# Altium footprint library DIM.PcbLib: 183 footprints (part 5 of 12)
Each footprint in its own frame and in the unit in brackets; x right, y up, seen from the top. Pads: shape width x height; smd on the part's side, far side on the other; paste and mask are expansions set on the pad; w line width, h text height; cw(c..) or ccw(c..) is an arc to the next point about the centre after c.
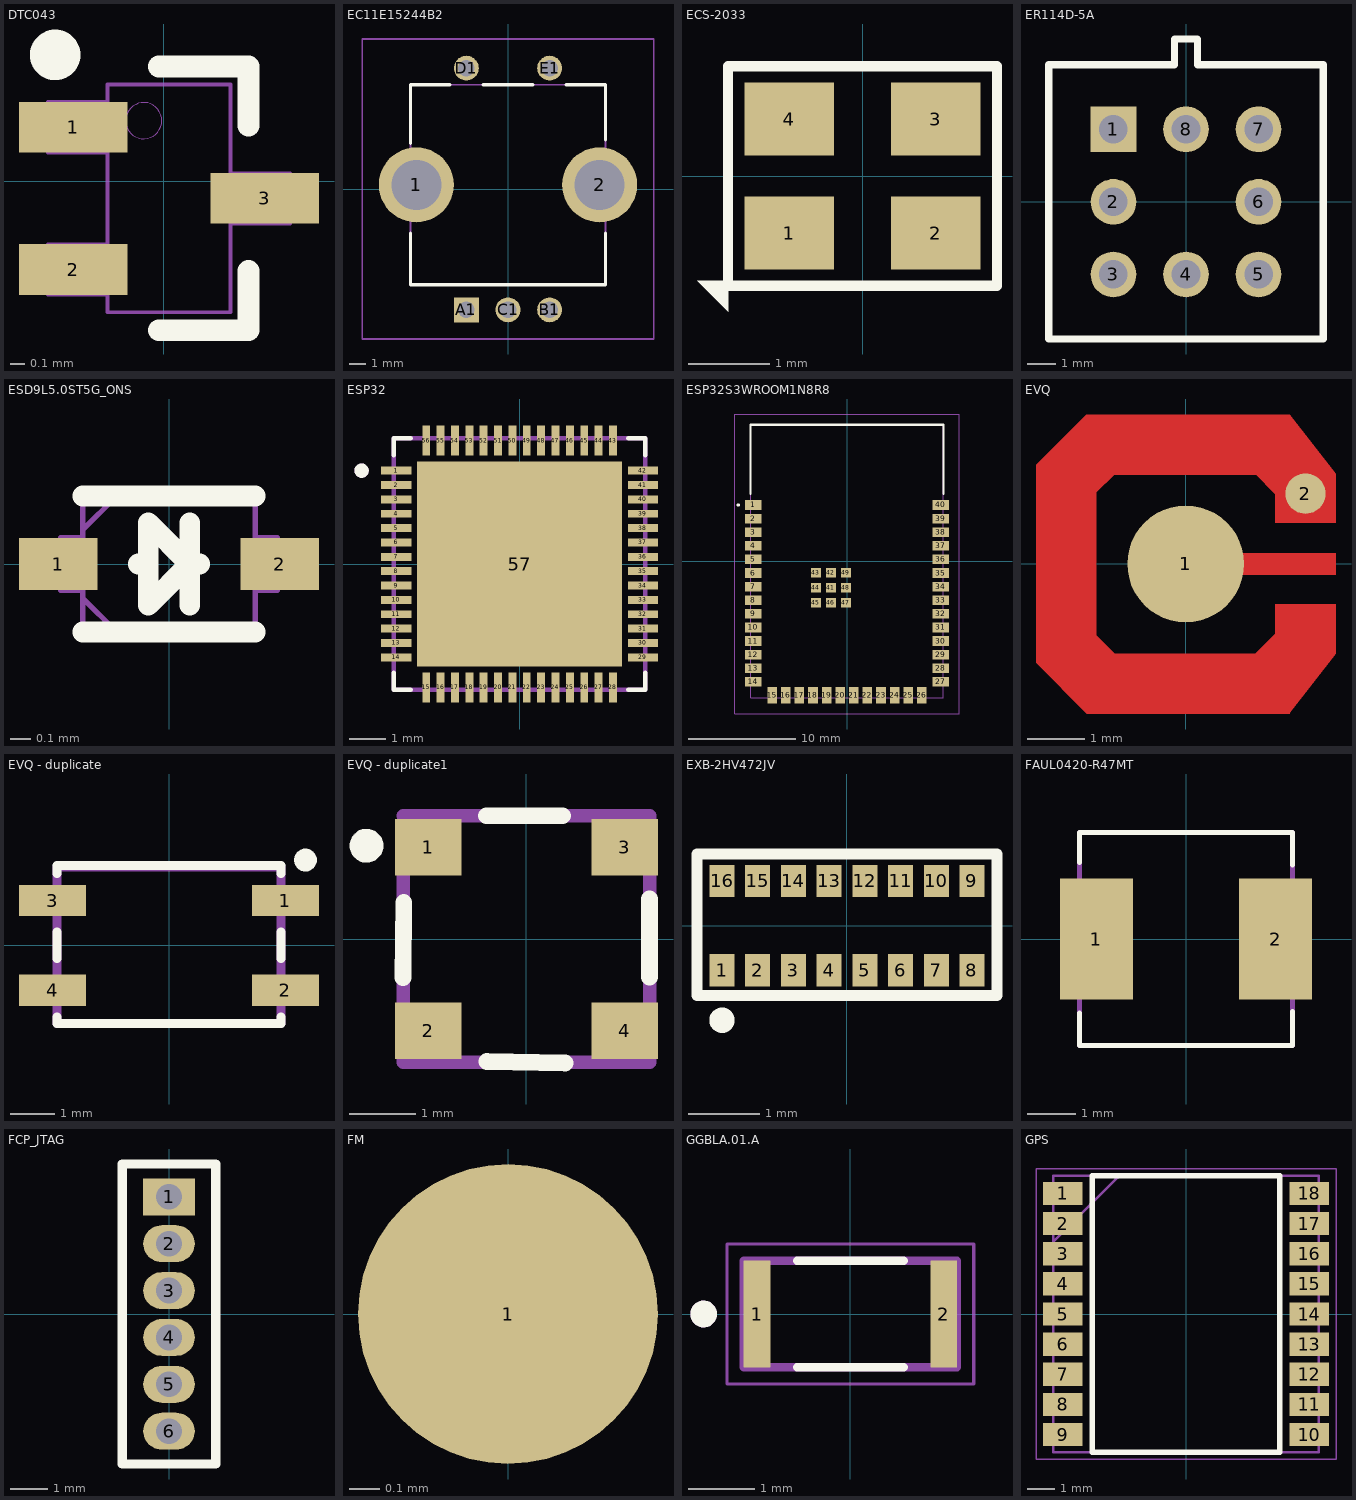
[diagram p4: the footprints below, top view; thin cyan lines are the x and y axes]

## DTC043 [mil]
pads (3):
  rect 30x14 smd: 1(-25,15) 3(28,-4.68)
  rect 30x14 smd mask+4: 2(-25,-24.37)
Top Overlay:
  circle w10: c-30,35 r2
  lines w6: -1.32,-41.19 23.5,-41.19 23.5,-24.79 ; -1.32,31.82 23.5,31.82 23.5,15.41
Mechanical 13:
  circle w0: c-5.5,16.82 r5
  lines w1: -32,-31.37 -32,-17.37 -15.5,-17.37 -15.5,-31.37 -32,-31.37 ; -32,8 -32,22 -15.5,22 -15.5,8 -32,8 ; -15.5,-36.19 -15.5,26.82 18.5,26.82 18.5,-36.19 -15.5,-36.19 ; 18.5,-11.69 18.5,2.31 35,2.31 35,-11.69 18.5,-11.69
3D body "TRANS_2SC4617EB_ROM.step": height 35.12, standoff 0, extent -32,-36.18 35,26.81

## EC11E15244B2 [mm]
pads (7):
  round 4.5 hole 3: 1(-5.5,0.25) 2(5.5,0.25)
  rect 1.5x1.5 hole 1: A1(-2.5,-7.25)
  round 1.5 hole 1: B1(2.5,-7.25) C1(0,-7.25) D1(-2.5,7.25) E1(2.5,7.25)
Top Overlay:
  lines w0.2: -5.85,-2.65 -5.85,-5.75 5.85,-5.75 5.85,-2.65 ; -5.85,2.75 -5.85,6.25 -3.5,6.25 ; -1.5,6.25 1.5,6.25 ; 3.5,6.25 5.85,6.25 5.85,2.95
Mechanical 13:
  lines w0.1: -5.85,-5.75 5.85,-5.75 5.85,6.25 -5.85,6.25 -5.85,-5.75
Mechanical 20:
  lines w0.1: -8.75,-9 8.75,-9 8.75,9 -8.75,9 -8.75,-9
3D body "EC11E15244B2.stp": height 24.9, standoff -3.1, extent -6.524,-7.522 6.575,7.428

## ECS-2033 [mm]
pads (4):
  rect 1.1x0.9 smd: 1(-0.9,-0.7) 2(0.9,-0.7) 3(0.9,0.7) 4(-0.9,0.7)
Top Overlay:
  region: -1.651,-1.283 -2.032,-1.283 -1.651,-1.664
  lines w0.127: -1.651,-1.346 -1.651,1.346 1.651,1.346 1.651,-1.346 -1.651,-1.346
3D body: height 1, standoff 0, extent -1.27,-1.016 1.27,1.016

## ER114D-5A [mm]
pads (8):
  rect 1.6x1.6 hole 1: 1(-2.54,2.54)
  round 1.6 hole 1: 2(-2.54,0) 3(-2.54,-2.54) 4(0,-2.54) 5(2.54,-2.54) 6(2.54,0) 7(2.54,2.54) 8(0,2.54)
Top Overlay:
  lines w0.254: -4.8,-4.8 -4.8,4.8 -0.4,4.8 -0.4,5.7 0.4,5.7 0.4,4.8 4.8,4.8 4.8,-4.8 -4.8,-4.8
3D body: height 10.2, standoff 0, extent -4.826,-4.826 4.826,4.826

## ESD9L5.0ST5G_ONS [mil]
pads (2):
  rect 15x10 smd paste+0 mask+4: 1(-21.17,0) 2(21.17,0)
Top Overlay:
  lines w3.94: -16.5,-13 16.5,-13 ; -16.5,13 16.5,13 ; -5.91,0 -3.94,0 ; 3.94,-7.87 3.94,0 ; 3.94,7.87 3.94,0 ; 5.91,0 3.94,0 ; 3.94,0 -3.94,-7.87 -3.94,7.87 3.94,0
Mechanical 13:
  lines w1: -16.5,-6.5 -10,-13 ; -16.5,6.5 -10,13 ; -20.67,-5 -16.5,-5 -16.5,5 -20.67,5 -20.67,-5 ; -16.5,-13 -16.5,13 16.5,13 16.5,-13 -16.5,-13 ; 16.5,-5 20.67,-5 20.67,5 16.5,5 16.5,-5
3D body "ESD9L50ST5G_ONS.step": height 16.26, standoff 0, extent -20.67,-12.99 20.67,12.99

## ESP32 [mm]
height 0.9
pads (57):
  rect 0.84x0.22 smd mask+0.05: 1(-3.435,2.6) 2(-3.435,2.2) 3(-3.435,1.8) 4(-3.435,1.4) 5(-3.435,1) 6(-3.435,0.6) 7(-3.435,0.2) 8(-3.435,-0.2) 9(-3.435,-0.6) 10(-3.435,-1) 11(-3.435,-1.4) 12(-3.435,-1.8) 13(-3.435,-2.2) 14(-3.435,-2.6) 29(3.435,-2.6) 30(3.435,-2.2) 31(3.435,-1.8) 32(3.435,-1.4) 33(3.435,-1) 34(3.435,-0.6) 35(3.435,-0.2) 36(3.435,0.2) 37(3.435,0.6) 38(3.435,1) 39(3.435,1.4) 40(3.435,1.8) 41(3.435,2.2) 42(3.435,2.6)
  rect 0.22x0.84 smd mask+0.05: 15(-2.6,-3.435) 16(-2.2,-3.435) 17(-1.8,-3.435) 18(-1.4,-3.435) 19(-1,-3.435) 20(-0.6,-3.435) 21(-0.2,-3.435) 22(0.2,-3.435) 23(0.6,-3.435) 24(1,-3.435) 25(1.4,-3.435) 26(1.8,-3.435) 27(2.2,-3.435) 28(2.6,-3.435) 43(2.6,3.435) 44(2.2,3.435) 45(1.8,3.435) 46(1.4,3.435) 47(1,3.435) 48(0.6,3.435) 49(0.2,3.435) 50(-0.2,3.435) 51(-0.6,3.435) 52(-1,3.435) 53(-1.4,3.435) 54(-1.8,3.435) 55(-2.2,3.435) 56(-2.6,3.435)
  rect 5.7x5.7 smd paste-4 mask+0.05: 57(0,0)
Top Overlay:
  circle w0.2: c-4.4,2.6 r0.1
  lines w0.127: -3.5,-3.03 -3.5,-3.5 -3.03,-3.5 ; -3.5,3.03 -3.5,3.5 -3.03,3.5 ; 3.03,-3.5 3.5,-3.5 3.5,-3.03 ; 3.03,3.5 3.5,3.5 3.5,3.03
Top Paste:
  region: -0.525,-2.325 -2.325,-2.325 -2.325,-0.525 -0.525,-0.525
  region: 2.325,-2.325 0.525,-2.325 0.525,-0.525 2.325,-0.525
  region: 2.325,0.525 0.525,0.525 0.525,2.325 2.325,2.325
  region: -0.525,0.525 -2.325,0.525 -2.325,2.325 -0.525,2.325
Mechanical 13:
  circle w0.2: c-4.4,2.6 r0.1
  lines w0.127: -3.5,-3.5 3.5,-3.5 3.5,3.5 -3.5,3.5 -3.5,-3.5
3D body "ESP32-S3FH4R2.stp": height 0.9, standoff 0, extent -3.55,-3.55 3.55,3.55

## ESP32S3WROOM1N8R8 [mm]
pads (49):
  rect 1.5x0.9 smd: 1(-8.75,5.26) 2(-8.75,3.99) 3(-8.75,2.72) 4(-8.75,1.45) 5(-8.75,0.18) 6(-8.75,-1.09) 7(-8.75,-2.36) 8(-8.75,-3.63) 9(-8.75,-4.9) 10(-8.75,-6.17) 11(-8.75,-7.44) 12(-8.75,-8.71) 13(-8.75,-9.98) 14(-8.75,-11.25) 27(8.75,-11.25) 28(8.75,-9.98) 29(8.75,-8.71) 30(8.75,-7.44) 31(8.75,-6.17) 32(8.75,-4.9) 33(8.75,-3.63) 34(8.75,-2.36) 35(8.75,-1.09) 36(8.75,0.18) 37(8.75,1.45) 38(8.75,2.72) 39(8.75,3.99) 40(8.75,5.26)
  rect 0.9x1.5 smd: 15(-6.985,-12.5) 16(-5.715,-12.5) 17(-4.445,-12.5) 18(-3.175,-12.5) 19(-1.905,-12.5) 20(-0.635,-12.5) 21(0.635,-12.5) 22(1.905,-12.5) 23(3.175,-12.5) 24(4.445,-12.5) 25(5.715,-12.5) 26(6.985,-12.5)
  rect 0.9x0.9 smd: 41(-1.5,-2.46) 42(-1.5,-1.06) 43(-2.9,-1.06) 44(-2.9,-2.46) 45(-2.9,-3.86) 46(-1.5,-3.86) 47(-0.1,-3.86) 48(-0.1,-2.46) 49(-0.1,-1.06)
Top Overlay:
  lines w0.2: -9,6.3 -9,12.75 9,12.75 9,6.3 ; -10.2,5.26 ccw(c-10.15,5.26) -10.1,5.26 ; -10.2,5.26 cw(c-10.15,5.26) -10.1,5.26 ; -10.2,5.26 ccw(c-10.15,5.26) -10.1,5.26
Mechanical 15:
  lines w0.1: -9,-12.75 9,-12.75 9,12.75 -9,12.75 -9,-12.75
Mechanical 20:
  lines w0.1: -10.5,-14.25 10.5,-14.25 10.5,13.75 -10.5,13.75 -10.5,-14.25
3D body "ESP32-S3-WROOM-1-N8R8.stp": height 3.1, standoff 0, extent -9,-12.75 9,12.75

## EVQ [mm]
pads (2):
  round 2.03 smd mask+0.051: 1(0,0)
  round 0.7 smd mask+0.051: 2(2.08,1.22)
Top Layer:
  rectangle: 0.73,-0.19 2.61,0.19
  rectangle: 1.55,0.71 2.61,1.224
  rectangle: 1.55,-1.232 2.61,-0.7
  region: 2.61,1.22 2.61,1.565 1.803,2.59 1.205,1.565 1.55,1.22
  region: 1.803,-1.56 -1.234,-1.56 -1.55,-1.244 -1.55,1.244 -1.244,1.55 1.803,1.55 1.803,2.59 -1.728,2.59 -2.6,1.718 -2.6,-1.718 -1.718,-2.6 1.803,-2.6
  region: 2.61,-1.22 2.61,-1.565 1.803,-2.59 1.205,-1.565 1.55,-1.22
Top Paste:
  rectangle: 1.55,-1.209 2.61,-0.695
  rectangle: 1.55,0.715 2.61,1.229
  rectangle: 0.73,-0.19 2.61,0.19
  region: 2.61,-1.215 2.61,-1.56 1.803,-2.585 1.205,-1.56 1.55,-1.215
  region: 2.61,1.225 2.61,1.57 1.803,2.595 1.205,1.57 1.55,1.225
  region: 1.803,-1.555 -1.234,-1.555 -1.55,-1.239 -1.55,1.249 -1.244,1.555 1.803,1.555 1.803,2.595 -1.728,2.595 -2.6,1.723 -2.6,-1.713 -1.718,-2.595 1.803,-2.595
Top Solder:
  rectangle: 1.55,0.715 2.61,1.229
  rectangle: 1.55,-1.209 2.61,-0.695
  rectangle: 0.73,-0.19 2.61,0.19
  region: 1.803,-1.555 -1.234,-1.555 -1.55,-1.239 -1.55,1.249 -1.244,1.555 1.803,1.555 1.803,2.595 -1.728,2.595 -2.6,1.723 -2.6,-1.713 -1.718,-2.595 1.803,-2.595
  region: 2.61,1.225 2.61,1.57 1.803,2.595 1.205,1.57 1.55,1.225
  region: 2.61,-1.215 2.61,-1.56 1.803,-2.585 1.205,-1.56 1.55,-1.215

## EVQ - duplicate [mm]
pads (4):
  rect 1.5x0.7 smd: 1(2.6,1) 2(2.6,-1) 3(-2.6,1) 4(-2.6,-1)
Top Overlay:
  circle w0.254: c3.048,1.905 r0.127
  lines w0.2: -2.5,-1.6 -2.5,-1.75 2.5,-1.75 2.5,-1.6 ; -2.5,-0.3 -2.5,0.3 ; -2.5,1.6 -2.5,1.778 -2.413,1.778 2.5,1.778 2.5,1.6 ; 2.5,-0.3 2.5,0.3
Mechanical 13:
  lines w0.2: -2.5,-1.75 2.5,-1.75 2.5,1.75 -2.5,1.75 -2.5,-1.75

## EVQ - duplicate1 [mm]
pads (4):
  rect 1x0.85 smd: 1(-1.475,1.375) 2(-1.475,-1.375) 3(1.475,1.375) 4(1.475,-1.375)
Top Overlay:
  circle w0.254: c-2.4,1.4 r0.127
  lines w0.254: -1.85,-0.58 -1.84,0.55 ; -0.6,1.85 0.54,1.85 ; -0.59,-1.84 0.58,-1.86 ; 1.85,-0.57 1.85,0.6
Mechanical 13:
  lines w0.2: -1.85,1.65 -1.85,-1.85 1.85,-1.85 1.85,1.85 -1.85,1.85

## EXB-2HV472JV [mm]
pads (16):
  rect 0.35x0.45 smd: 1(-1.75,-0.625) 2(-1.25,-0.625) 3(-0.75,-0.625) 4(-0.25,-0.625) 5(0.25,-0.625) 6(0.75,-0.625) 7(1.25,-0.625) 8(1.75,-0.625) 9(1.75,0.625) 10(1.25,0.625) 11(0.75,0.625) 12(0.25,0.625) 13(-0.25,0.625) 14(-0.75,0.625) 15(-1.25,0.625) 16(-1.75,0.625)
Top Overlay:
  circle w0.254: c-1.75,-1.325 r0.05
  lines w0.154: -2.1,-0.975 -2.1,1 2.1,1 2.1,-0.975 -1.85,-0.975 -2.1,-0.975
3D body: height 1, standoff 0, extent -2.1,-0.95 2.05,0.95

## FAUL0420-R47MT [mm]
pads (2):
  rect 1.5x2.5 smd: 1(-1.85,0) 2(1.85,0)
Top Overlay:
  lines w0.1: -2.2,-1.524 -2.2,-2.2 2.2,-2.2 2.2,-1.499 ; -2.2,1.575 -2.2,2.2 2.2,2.2 2.2,1.524
Mechanical 13:
  lines w0.1: -2.2,-2.2 1.8,-2.2 2.2,-2.2 2.2,2.2 -2.2,2.2 -2.2,-2.2
3D body: height 2.1, standoff 0, extent -2.2,-2.2 2.2,2.2

## FCP_JTAG [mm]
pads (6):
  rect 1.4x1 hole 0.7: 1(0,3.175)
  oval 1.4x1 hole 0.7: 2(0,1.905) 3(0,0.635) 4(0,-0.635) 5(0,-1.905) 6(0,-3.175)
Top Overlay:
  lines w0.254: -1.27,-4.064 1.27,-4.064 1.27,4.064 -1.27,4.064 -1.27,-4.064

## FM [mm]
pads (1):
  round 1 smd: 1(0,0)
Top Layer:
  pour cut-out: 0.097,0.097 0.137,0 0.097,-0.097 0,-0.137 -0.097,-0.097 -0.137,0 -0.097,0.097 0,0.137

## GGBLA.01.A [mm]
pads (2):
  rect 0.4x1.6 smd: 1(-1.4,0) 2(1.4,0)
Top Overlay:
  circle w0.2: c-2.2,0 r0.1
  lines w0.127: -0.8,-0.8 0.8,-0.8 ; -0.8,0.8 0.8,0.8
Mechanical 13:
  circle w0.2: c-2.2,0 r0.1
  lines w0.127: -1.6,-0.8 -1.6,0.8 1.6,0.8 1.6,-0.8 -1.6,-0.8
Mechanical 15:
  lines w0.05: -1.85,-1.05 -1.85,1.05 1.85,1.05 1.85,-1.05 -1.85,-1.05
3D body: height 1, standoff 0, extent -1.6,-0.8 1.6,0.8

## GPS [mm]
pads (18):
  rect 1.45x0.85 smd: 1(-4.5,4.4) 2(-4.5,3.3) 3(-4.5,2.2) 4(-4.5,1.1) 5(-4.5,0) 6(-4.5,-1.1) 7(-4.5,-2.2) 8(-4.5,-3.3) 9(-4.5,-4.4) 10(4.5,-4.4) 11(4.5,-3.3) 12(4.5,-2.2) 13(4.5,-1.1) 14(4.5,0) 15(4.5,1.1) 16(4.5,2.2) 17(4.5,3.3) 18(4.5,4.4)
Top Overlay:
  lines w0.2: -3.425,-5.05 3.425,-5.05 3.425,5.05 -3.425,5.05 -3.425,-5.05
Mechanical 13:
  lines w0.05: -5.475,-5.3 5.475,-5.3 5.475,5.3 -5.475,5.3 -5.475,-5.3
  lines w0.1: -4.85,2.625 -2.425,5.05 ; -4.85,-5.05 4.85,-5.05 4.85,5.05 -4.85,5.05 -4.85,-5.05
3D body "step_temp.STEP": height 2.2, standoff 0, extent -5.05,-4.85 5.05,4.85